# Altium footprint library final_complete_merge.PcbLib: 106 footprints (part 6 of 7)
Each footprint in its own frame and in the unit in brackets; x right, y up, seen from the top. Pads: shape width x height; smd on the part's side, far side on the other; paste and mask are expansions set on the pad; w line width, h text height; cw(c..) or ccw(c..) is an arc to the next point about the centre after c.
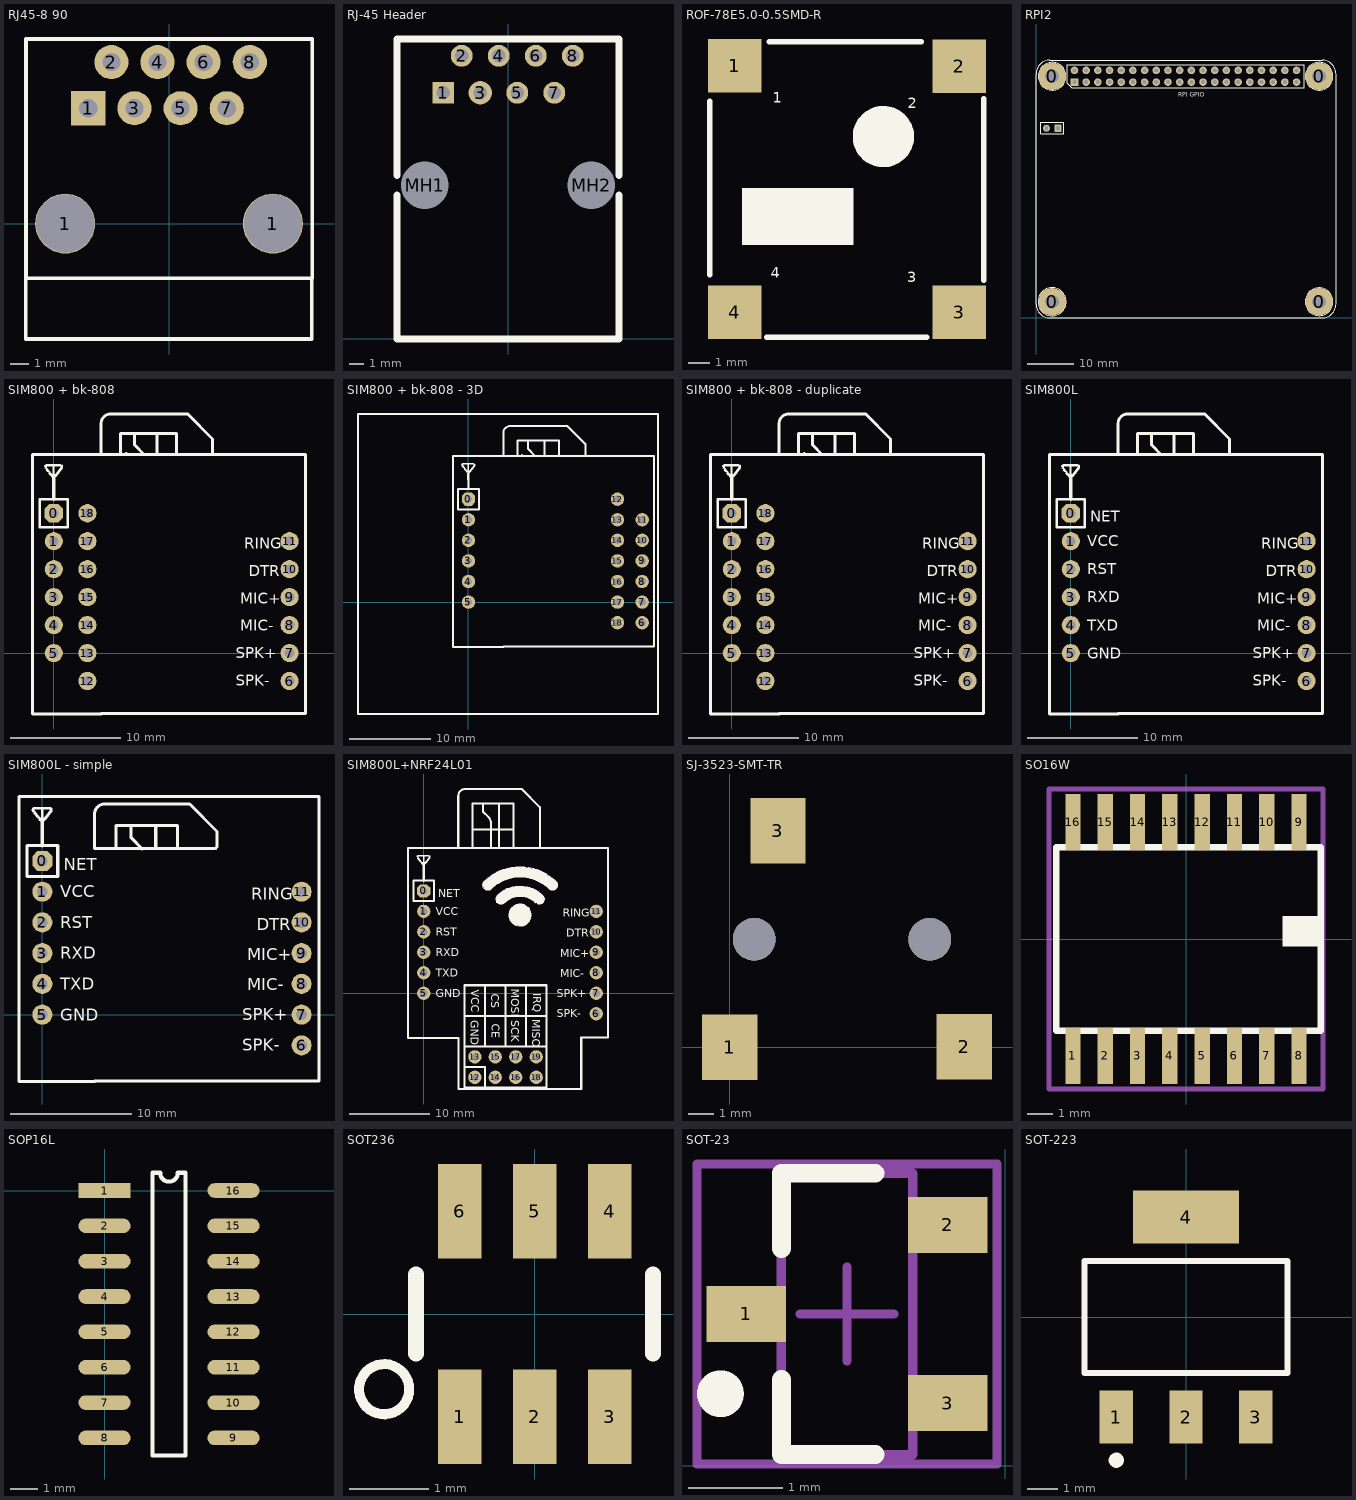
[diagram p5: the footprints below, top view; thin cyan lines are the x and y axes]

## RJ45-8 90 [mil] "RJ45 90 degrees"
pads (10):
  round 130 hole 125.98: 1(-225,0) 1(225,0)
  rect 74x74 hole 39.37: 1(-175,250)
  round 74 hole 39.37: 2(-125,350) 3(-75,250) 4(-25,350) 5(25,250) 6(75,350) 7(125,250) 8(175,350)
Top Overlay:
  lines w8: -310.24,-118.11 -310.24,-250 309.06,-250 309.06,-118.11 ; -310,-118.11 -310,400 310,400 310,-118.11 -310,-118.11
3D body "43758.stp": height 636.93, standoff -134.72, extent -305.11,-246.93 305.12,386.93

## RJ-45 Header [mm] "Connector; PCB Jack, Thru-Hole; 1-Port; Unshielded without Lightpipes; Right Angle"
height 18.92
pads (10):
  rect 1.5x1.5 hole 0.9: 1(-4.445,16.89)
  round 1.5 hole 0.9: 2(-3.175,19.43) 4(-0.635,19.43) 5(0.635,16.89) 6(1.905,19.43) 7(3.175,16.89) 8(4.445,19.43)
  round 1.6 hole 0.9: 3(-1.905,16.89)
  round 2.95 hole 3.25 unplated: MH1(-5.715,10.54) MH2(5.715,10.54)
Top Overlay:
  lines w0.5: -7.62,9.853 -7.62,0 7.62,0 7.62,9.853 ; -7.62,11.227 -7.62,20.58 7.62,20.58 7.62,11.227

## ROF-78E5.0-0.5SMD-R [mm] "SMD Switching Regulator"
pads (4):
  rect 2.5x2.5 smd: 1(2.695,13.857) 2(13.207,13.832) 3(13.207,2.32) 4(2.695,2.32)
Top Overlay:
  circle w1.5: c9.652,10.541 r0.684
  rectangle: 3.048,5.461 8.255,8.128
  lines w0.254: 1.524,4.064 1.524,12.192 ; 4.191,1.143 11.684,1.143 ; 4.318,14.986 11.43,14.986 ; 14.351,3.81 14.351,12.319
  text "3" at 10.779,3.725 h0.5
  text "4" at 4.375,3.925 h0.5
  text "2" at 10.8,11.875 h0.5
  text "1" at 4.475,12.129 h0.5
3D body "ROF-785.0.stp": height 4.01, standoff 0.01, extent 1.7,1.325 14.2,14.825

## RPI2 [mil]
pads (46):
  round 236.22 hole 118.11: 0(137.8,137.8) 0(137.8,2066.93) 0(2421.26,137.8) 0(2421.26,2066.93)
  rect 65x65 hole 35: P$1(329.53,2016.93)
  round 65 hole 35: P$2(329,2117) P$3(429,2017) P$4(429,2117) P$5(529,2017) P$6(529,2117) P$7(629,2017) P$8(629,2117) P$9(729,2017) P$10(729,2117) P$11(829,2017) P$12(829,2117) P$13(929,2017) P$14(929,2117) P$15(1029,2017) P$16(1029,2117) P$17(1129,2017) P$18(1129,2117) P$19(1229,2017) P$20(1229,2117) P$21(1329,2017) P$22(1329,2117) P$23(1429,2017) P$24(1429,2117) P$25(1529,2017) P$26(1529,2117) P$27(1629,2017) P$28(1629,2117) P$29(1729,2017) P$30(1729,2117) P$31(1829,2017) P$32(1829,2117) P$33(1929,2017) P$34(1929,2117) P$35(2029,2017) P$36(2029,2117) P$37(2129,2017) P$38(2129,2117) P$39(2229,2017) P$40(2229,2117)
  rect 60x60 hole 35: P$41(188.98,1622.05)
  round 60 hole 35: P$42(88.98,1622.05)
Top Overlay:
  circle w5: c137.8,137.8 r120
  circle w5: c2421.26,137.8 r118.11
  circle w5: c2421.26,2066.93 r118.11
  circle w5: c137.8,2066.93 r118.11
  lines w5: 2448.35,0 ccw(c2448.35,118.11) 2566.46,118.11 2566.46,2086.61 ccw(c2448.35,2086.61) 2448.35,2204.72 ; 2450,0 118.11,0 cw(c118.11,118.11) 0,118.11 0,2086.61 cw(c118.11,2086.61) 118.11,2204.72 2450,2204.72 ; 39.37,1574.8 39.37,1673.23 236.22,1673.23 236.22,1574.8 39.37,1574.8 ; 265.32,2007.94 265.32,2165.43 2292.87,2165.43 2292.87,1968.57 304.69,1968.57 265.32,2007.94
  text "RPI GPIO" at 1215,1880 h62
3D body "Header Female 1x10.STEP": height 68.41, standoff -399.11, extent 1248.19,1971.28 2271.81,2068.72
3D body "Header Female 1x10.STEP": height 68.41, standoff -399.11, extent 1253.19,2071.28 2276.81,2168.72
3D body "Header Female 1x10.STEP": height 68.41, standoff -399.11, extent 253.19,1971.28 1276.81,2068.72
3D body "Header Female 1x10.STEP": height 68.41, standoff -399.11, extent 253.19,2071.28 1276.81,2168.72
3D body "RaspberryPi2 STEP214.STEP": height 116.18, standoff -621.87, extent -76.96,-92.91 3451.39,2202.36

## SIM800 + bk-808 [mil]
pads (19):
  oct 65x65 hole 35: 0(0,500)
  round 65 hole 35: 1(0,400) 2(0,300) 3(0,200) 4(0,100) 5(0,0) 6(843.31,-100) 7(843.31,0) 8(843.31,100) 9(843.31,200) 10(843.31,300) 11(843.31,400) 12(120,-100) 13(120,0) 14(120,100) 15(120,200) 16(120,300) 17(120,400) 18(120,500)
Top Overlay:
  drawing of 29 lines, arcs and shapes, not listed
  text "SPK-" at 650,-117 h39.37
  text "SPK+" at 650,-19 h39.37
  text "MIC-" at 666.49,79 h39.37
  text "MIC+" at 666.49,177 h39.37
  text "DTR" at 696.67,275 h39.37
  text "RING" at 680.36,373 h39.37
3D body "sim800_board.SLDPRT": height 278.74, standoff 44.88, extent -70.58,-218 906.58,699.32

## SIM800 + bk-808 - 3D [mil]
pads (19):
  oct 65x65 hole 35: 0(0,500)
  round 65 hole 35: 1(0,400) 2(0,300) 3(0,200) 4(0,100) 5(0,0) 6(843.31,-100) 7(843.31,0) 8(843.31,100) 9(843.31,200) 10(843.31,300) 11(843.31,400) 12(723.31,500) 13(723.31,400) 14(723.31,300) 15(723.31,200) 16(723.31,100) 17(723.31,0) 18(723.31,-100)
Top Overlay:
  drawing of 34 lines, arcs and shapes, not listed
3D body: height 472.44, standoff 375.59, extent -556.22,-562.99 920.16,933.07
3D body "sim800_board.SLDPRT": height 278.74, standoff 44.88, extent -70.58,-218 906.58,699.32

## SIM800 + bk-808 - duplicate [mil]
pads (19):
  oct 65x65 hole 35: 0(0,500)
  round 65 hole 35: 1(0,400) 2(0,300) 3(0,200) 4(0,100) 5(0,0) 6(843.31,-100) 7(843.31,0) 8(843.31,100) 9(843.31,200) 10(843.31,300) 11(843.31,400) 12(120,-100) 13(120,0) 14(120,100) 15(120,200) 16(120,300) 17(120,400) 18(120,500)
Top Overlay:
  drawing of 29 lines, arcs and shapes, not listed
  text "RING" at 680.36,373 h39.37
  text "DTR" at 696.67,275 h39.37
  text "MIC+" at 666.49,177 h39.37
  text "MIC-" at 666.49,79 h39.37
  text "SPK+" at 650,-19 h39.37
  text "SPK-" at 650,-117 h39.37
3D body "sim800_board.SLDPRT": height 278.74, standoff 44.88, extent -70.58,-218 906.58,699.32

## SIM800L [mil]
pads (12):
  oct 65x65 hole 35: 0(0,500)
  round 65 hole 35: 1(0,400) 2(0,300) 3(0,200) 4(0,100) 5(0,0) 6(843.31,-100) 7(843.31,0) 8(843.31,100) 9(843.31,200) 10(843.31,300) 11(843.31,400)
Top Overlay:
  drawing of 30 lines, arcs and shapes, not listed
  text "SPK-" at 650,-117 h39.37
  text "SPK+" at 650,-19 h39.37
  text "MIC-" at 666.49,79 h39.37
  text "MIC+" at 666.49,177 h39.37
  text "DTR" at 696.67,275 h39.37
  text "RING" at 680.36,373 h39.37
  text "NET" at 70,470 h39.37
  text "VCC" at 59,382 h39.37
  text "RST" at 59,281.5 h39.37
  text "RXD" at 59,181 h39.37
  text "TXD" at 59,80.5 h39.37
  text "GND" at 59,-20 h39.37
3D body "sim800_board.SLDPRT": height 278.74, standoff 44.88, extent -70.58,-218 906.58,699.32

## SIM800L - simple [mil]
pads (12):
  oct 65x65 hole 35: 0(0,500)
  round 65 hole 35: 1(0,400) 2(0,300) 3(0,200) 4(0,100) 5(0,0) 6(843.31,-100) 7(843.31,0) 8(843.31,100) 9(843.31,200) 10(843.31,300) 11(843.31,400)
Top Overlay:
  drawing of 29 lines, arcs and shapes, not listed
  text "GND" at 59,-20 h39.37
  text "TXD" at 59,80.5 h39.37
  text "RXD" at 59,181 h39.37
  text "RST" at 59,281.5 h39.37
  text "VCC" at 59,382 h39.37
  text "NET" at 70,470 h39.37
  text "RING" at 680.36,373 h39.37
  text "DTR" at 696.67,275 h39.37
  text "MIC+" at 666.49,177 h39.37
  text "MIC-" at 666.49,79 h39.37
  text "SPK+" at 650,-19 h39.37
  text "SPK-" at 650,-117 h39.37
3D body "sim800_board.SLDPRT": height 278.74, standoff 44.88, extent -70.58,-218 906.58,699.32

## SIM800L+NRF24L01 [mil]
pads (20):
  oct 65x65 hole 35: 0(0,500)
  round 65 hole 35: 1(0,400) 2(0,300) 3(0,200) 4(0,100) 5(0,0) 6(843.31,-100) 7(843.31,0) 8(843.31,100) 9(843.31,200) 10(843.31,300) 11(843.31,400) 12(250,-411) 13(250,-311) 14(350,-411) 15(350,-311) 16(450,-411) 17(450,-311) 18(550,-411) 19(550,-311)
Top Overlay:
  drawing of 57 lines, arcs and shapes, not listed
  text "VCC" at 233,16 h39.37
  text "CS" at 330,-3 h39.37
  text "MOSI" at 427,21 h39.37
  text "IRQ" at 535,1 h39.37
  text "MISO" at 530,-128 h39.37
  text "SCK" at 427,-132 h39.37
  text "CE" at 332,-149 h39.37
  text "GND" at 231,-132 h39.37
  text "SPK-" at 650,-117 h39.37
  text "SPK+" at 650,-19 h39.37
  text "MIC-" at 666.49,79 h39.37
  text "MIC+" at 666.49,177 h39.37
  text "DTR" at 696.67,275 h39.37
  text "RING" at 680.36,373 h39.37
  text "NET" at 70,470 h39.37
  text "VCC" at 59,382 h39.37
  text "RST" at 59,281.5 h39.37
  text "RXD" at 59,181 h39.37
  text "TXD" at 59,80.5 h39.37
  text "GND" at 59,-20 h39.37
3D body "sim800_board.SLDPRT": height 278.74, standoff 44.88, extent -70.58,-218 906.58,699.32
3D body "?????? ?????????? NRF24L01+.STEP": height 503.94, standoff -19.69, extent 176.67,-467 781,666.85

## SJ-3523-SMT-TR [mm] "3.50mm (0.141\", 1/8\", Mini Plug) - Headphone Phone Jack Stereo Connector Solder CP-3523SJTR-ND"
pads (5):
  rect 2.2x2.6 / inner rect 2.2x2.6 / far side rect 0x0 all layers, no hole: 1(0,0) 2(9.35,0.025) 3(1.925,8.625)
  round 1.7 hole 1.7: ""(0.975,4.3) ""(7.975,4.3)
3D body "CUI_SJ-3523-SMT-TR.step": height 5.09, standoff -0.71, extent -5,-0.175 12,8.825

## SO16W [mil]
pads (16):
  rect 23.62x86.61 smd: 1(-175,-181.1) 2(-125,-181.1) 3(-75,-181.1) 4(-25,-181.1) 5(25,-181.1) 6(75,-181.1) 7(125,-181.1) 8(175,-181.1) 9(175,181.1) 10(125,181.1) 11(75,181.1) 12(25,181.1) 13(-25,181.1) 14(-75,181.1) 15(-125,181.1) 16(-175,181.1)
Top Overlay:
  rectangle: 149.61,-11.81 208.66,35.43
  lines w10: -200.79,-141.73 208.66,-141.73 208.66,141.73 -200.79,141.73 -200.79,-141.73
Mechanical 16:
  rectangle: -184.65,-209.45 -165.35,-149.61
  rectangle: -134.65,-209.45 -115.35,-149.61
  rectangle: -84.65,-209.45 -65.35,-149.61
  rectangle: -34.65,-209.45 -15.35,-149.61
  rectangle: 15.35,-209.45 34.65,-149.61
  rectangle: 65.35,-209.45 84.65,-149.61
  rectangle: 115.35,-209.45 134.65,-149.61
  rectangle: 165.35,-209.45 184.65,-149.61
  rectangle: 165.35,149.61 184.65,209.45
  rectangle: 115.35,149.61 134.65,209.45
  rectangle: 65.35,149.61 84.65,209.45
  rectangle: 15.35,149.61 34.65,209.45
  rectangle: -34.65,149.61 -15.35,209.45
  rectangle: -84.65,149.61 -65.35,209.45
  rectangle: -134.65,149.61 -115.35,209.45
  rectangle: -184.65,149.61 -165.35,209.45
Mechanical 27:
  lines w7.87: -212.4,-232.28 212.4,-232.28 212.4,232.28 -212.4,232.28 -212.4,-232.28
3D body "SOIC16 wide.stp": height 78.74, standoff 0.13, extent -198.43,-200.06 198.43,200.06

## SOP16L [mil]
pads (16):
  rect 73.78x20.65 smd: 1(0,0)
  oval 73.78x20.65 smd: 2(0,-50) 3(0,-100) 4(0,-150) 5(0,-200) 6(0,-250) 7(0,-300) 8(0,-350) 9(182.37,-350) 10(182.37,-300) 11(182.37,-250) 12(182.37,-200) 13(182.37,-150) 14(182.37,-100) 15(182.37,-50) 16(182.37,0)
Top Overlay:
  lines w5.91: 67.8,-375 114.57,-375 114.57,25 103.68,25 cw(c91.18,25) 78.68,25 67.8,25 67.8,-375
3D body: height 78.74, standoff 0, extent 0,-350 182.37,0

## SOT236 [mil]
pads (6):
  rect 21.65x47.24 smd: 1(-37.4,-51.18) 2(0,-51.18) 3(37.4,-51.18) 4(37.4,51.18) 5(0,51.18) 6(-37.4,51.18)
Top Overlay:
  circle w5: c-75,-37.5 r12.5
  lines w8: -59.06,-19.69 -59.06,19.69 ; 59.06,-19.69 59.06,19.69
3D body "sot-23-6.stp": height 45.43, standoff 1.43, extent -58,-56 57,56

## SOT-23 [mm]
pads (3):
  rect 0.85x0.6 smd: 1(-2.764,1.618) 2(-0.614,2.568) 3(-0.614,0.668)
Top Overlay:
  circle w0.25: c-3.039,0.768 r0.125
  lines w0.2: -2.389,0.918 -2.389,0.118 -1.389,0.118 ; -2.389,2.318 -2.389,3.118 -1.389,3.118
Mechanical 13:
  lines w0.1: -2.389,0.118 -0.989,0.118 -0.989,3.118 -2.389,3.118 -2.389,0.118
Mechanical 15:
  lines w0.1: -2.189,1.618 -1.189,1.618 ; -1.689,1.118 -1.689,2.118 ; -3.289,0.018 -0.089,0.018 -0.089,3.218 -3.289,3.218 -3.289,0.018
3D body: height 1.1, standoff 0, extent -2.389,0.118 -0.989,3.118

## SOT-223 [mm] "SOT-223/SC-73; 4 Leads; Body 6.7 x 7.3 mm, inc. leads (LxW max)"
height 1.75
pads (4):
  rect 1.1x1.75 smd: 1(-2.3,-3.3) 2(0,-3.3) 3(2.3,-3.3)
  rect 3.5x1.75 smd: 4(0,3.3)
Top Overlay:
  circle w0.25: c-2.3,-4.725 r0.125
  lines w0.2: -3.35,-1.85 -3.35,1.85 3.35,1.85 3.35,-1.85 -3.35,-1.85
3D body "SOT-223-2.STEP": height 1.85, standoff -0.05, extent -3.35,-3.704 3.35,3.5